# Altium schematic symbol library Diode%.SchLib: 376 symbols (part 4 of 9)
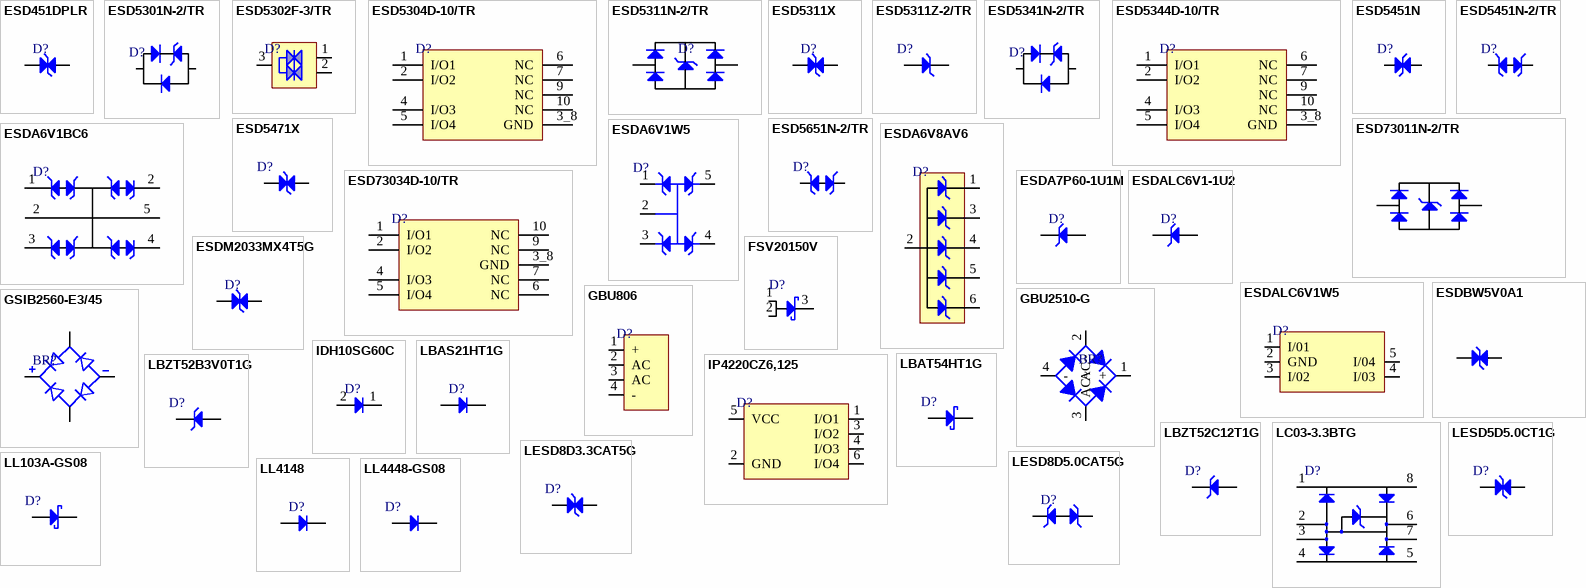
[diagram p12: symbols ESD451DPLR to LL4448-GS08]

## ESDALC6V1-1U2
designator D?
TVS DIODE 3VWM ST0201; Manufacturer: STMicroelectronics; Manufacturer Part Number: ESDALC6V1-1U2; Direction: Unidirectional; Value: 12pF; Number of Channels: 1; Reverse Breakdown Voltage: 6.1V; Reverse Standoff Voltage: 3V; Peak Pulse Power: 20W; Power Line Protection: No; Clamping Voltage: 12.2V; ESD Protection: Yes; Test Current: 1mA; Max Reverse Leakage Current: 100nA; Max Breakdown Voltage: 8V; Peak Pulse Current: 2A; Diode Type: ZENER; Supplier: Future Electronics; Supplier Part Number: 3110124; RoHS: Yes; Category: TVS Diodes; Stock: 405000; Pricing: 15000=0.0377, 45000=0.0364, 60000=0.0361, 150000=0.0351, 225000=0.0341 (USD); Mounting Technology: Surface Mount; Case/Package: 0201; Pins: 2; Case Code (Metric): 0603; Case Code (Imperial): 0201; Min Operating Temperature: -40°C; Max Operating Temperature: 125°C; Packaging: Tape and Reel; Number of Elements: 1; Number of Unidirectional Channels: 1; Min Breakdown Voltage: 6.1V; Breakdown Voltage: 6.1V; Polarity: Unidirectional; Termination: SMD/SMT; Leakage Current: 100nA; Max Power Dissipation: 20W; Power Dissipation: 20W; Series: ESDA, TRANSIL™; Length: 0.6mm; Width: 0.35mm; Height: 0.33mm; Depth: 0.3mm; Radiation Hardening: No; Reach SVHC Compliant: No; Lead Free: Lead Free; RoHS Compliant: Yes; ComponentLink1URL: https://datasheet.ciiva.com/1276/1684876-1276912.pdf?src-supplier=Element14; ComponentLink1Description: https://datasheet.ciiva.com/1276/1684876-1276912.pdf?src-supplier=Element14; ComponentLink2URL: https://datasheet.ciiva.com/4507/cd00212838-88488-4507763.pdf?src-supplier=Mouser; ComponentLink2Description: https://datasheet.ciiva.com/4507/cd00212838-88488-4507763.pdf?src-supplier=Mouser; ComponentLink3URL: https://datasheet.ciiva.com/16205/cd00212838-16205762.pdf?src-supplier=Future+Electronics; ComponentLink3Description: https://datasheet.ciiva.com/16205/cd00212838-16205762.pdf?src-supplier=Future+Electronics; ComponentLink4URL: https://datasheet.ciiva.com/15143/getdatasheetpartid-185245-15143908.pdf?src-supplier=Verical; ComponentLink4Description: https://datasheet.ciiva.com/15143/getdatasheetpartid-185245-15143908.pdf?src-supplier=Verical; ComponentLink5URL: https://datasheet.ciiva.com/22695/1684876-22695674.pdf?src-supplier=Element14; ComponentLink5Description: https://datasheet.ciiva.com/22695/1684876-22695674.pdf?src-supplier=Element14; ComponentLink6URL: https://datasheet.ciiva.com/337/cd00212838-337652.pdf?src-supplier=Digikey; ComponentLink6Description: https://datasheet.ciiva.com/337/cd00212838-337652.pdf?src-supplier=Digikey; ComponentLink7URL: https://datasheet.ciiva.com/337/cd00212838-337651.pdf?src-supplier=Digikey; ComponentLink7Description: https://datasheet.ciiva.com/337/cd00212838-337651.pdf?src-supplier=Digikey; ComponentLink8URL: https://datasheet.ciiva.com/337/cd00212838-337653.pdf?src-supplier=Digikey; ComponentLink8Description: https://datasheet.ciiva.com/337/cd00212838-337653.pdf?src-supplier=Digikey; ComponentLink9URL: https://datasheet.ciiva.com/11193/cd00212838-11193350.pdf?src-supplier=Avnet; ComponentLink9Description: https://datasheet.ciiva.com/11193/cd00212838-11193350.pdf?src-supplier=Avnet; ComponentLink10URL: https://datasheet.ciiva.com/41443/001184301-da-01-en-transil-sgl-un-esdalc6v1-1u2-st-0201-stm-41443159.pdf?src-supplier=Conrad; ComponentLink10Description: https://datasheet.ciiva.com/41443/001184301-da-01-en-transil-sgl-un-esdalc6v1-1u2-st-0201-stm-41443159.pdf?src-supplier=Conrad
footprint Diode-0201
pins: 1 K, 2 A

## ESDALC6V1W5
designator D?
TVS DIODE 3VWM SOT323-5; Manufacturer: STMicroelectronics; Manufacturer Part Number: ESDALC6V1W5; Item Type: TVS Diodes; Supplier: Future Electronics; LCSC Part Number: C703691; RoHS: Yes; Stock: 3000; Pricing: 3000=0.0569, 9000=0.0547, 12000=0.0774, 15000=0.0538, 30000=0.0749, 45000=0.0518, 75000=0.05 (USD); ComponentLink1URL: https://datasheet.ciiva.com/23847/cd00002946-23847220.pdf?src-supplier=Newark; ComponentLink1Description: https://datasheet.ciiva.com/23847/cd00002946-23847220.pdf?src-supplier=Newark; ComponentLink2URL: https://datasheet.ciiva.com/4509/cd00002946-81943-4509940.pdf?src-supplier=Mouser; ComponentLink2Description: https://datasheet.ciiva.com/4509/cd00002946-81943-4509940.pdf?src-supplier=Mouser; ComponentLink3URL: https://datasheet.ciiva.com/5782/cd00002946-5782886.pdf?src-supplier=Farnell; ComponentLink3Description: https://datasheet.ciiva.com/5782/cd00002946-5782886.pdf?src-supplier=Farnell; ComponentLink4URL: https://datasheet.ciiva.com/338/cd00002946-338376.pdf?src-supplier=Digikey; ComponentLink4Description: https://datasheet.ciiva.com/338/cd00002946-338376.pdf?src-supplier=Digikey; ComponentLink5URL: https://datasheet.ciiva.com/338/cd00002946-338377.pdf?src-supplier=Digikey; ComponentLink5Description: https://datasheet.ciiva.com/338/cd00002946-338377.pdf?src-supplier=Digikey; ComponentLink6URL: https://datasheet.ciiva.com/338/cd00002946-338378.pdf?src-supplier=Digikey; ComponentLink6Description: https://datasheet.ciiva.com/338/cd00002946-338378.pdf?src-supplier=Digikey
footprint SOT-323-5
pins: 1 I/01, 2 GND, 3 I/02, 4 I/03, 5 I/04

## ESDBW5V0A1
designator D?
DFN1006 ESD Protection Devices ROHS; Manufacturer: Leiditech; Manufacturer Part Number: ESDBW5V0A1; Item Type: ESD Diode; Package: DFN1006; LCSC Part Number: C5173252; ComponentLink1Description: LCSC; ComponentLink1URL: https://www.lcsc.com/product-detail/span-style-background-color-ff0-ESD-span-Protection-Devices_Leiditech-ESDBW5V0A1_C5173252.html
footprint DFN1006-2L_
pins: 1 A, 2 A

## ESDM2033MX4T5G
designator D?
DIODE BIDIR ESD X4DFN2; Manufacturer: ON Semiconductor; Manufacturer Part Number: ESDM2033MX4T5G; Item Type: (TVS/ESD); Supplier: Avnet; LCSC Part Number: C896720; RoHS: Yes; Stock: 629400; Pricing: 8961=0.04129, 9000=0.04018, 18000=0.03906, 45000=0.03794, 90000=0.03683, 450000=0.03571, 900000=0.0346 (USD); Series: -
footprint DFN-2(0.3x0.6)
pins: 1 A, 2 A

## FSV20150V
designator D?
DIODE SCHOTTKY 150V 20A TO2773; Manufacturer: ON Semiconductor / Fairchild; Manufacturer Part Number: FSV20150V; Item Type: Diodes; Supplier: Arrow Electronics; LCSC Part Number: C606024; RoHS: Yes; Stock: 3539; Pricing: 1=1.4397, 10=1.0081, 25=0.9981, 100=0.7548, 250=0.7285, 500=0.6712, 1000=0.6139, 3000=0.5566 (USD); ComponentLink1URL: http://www.farnell.com/datasheets/2552639.pdf?src-supplier=Farnell; ComponentLink1Description: http://www.farnell.com/datasheets/2552639.pdf?src-supplier=Farnell; ComponentLink2URL: https://www.onsemi.com/pub/Collateral/FSV20150V-D.PDF?src-supplier=Digikey; ComponentLink2Description: https://www.onsemi.com/pub/Collateral/FSV20150V-D.PDF?src-supplier=Digikey; ComponentLink3URL: https://www.fairchildsemi.com/datasheets/FS/FSV20150V.pdf?src-supplier=Digikey; ComponentLink3Description: https://www.fairchildsemi.com/datasheets/FS/FSV20150V.pdf?src-supplier=Digikey; ComponentLink4URL: http://www.farnell.com/datasheets/2552639.pdf?src-supplier=Newark; ComponentLink4Description: http://www.farnell.com/datasheets/2552639.pdf?src-supplier=Newark
footprint TO-277A
pins: 1 A, 2 A, 3 K

## GBU806
designator D?
BRIDGE RECT 1PHASE 600V 8A GBU; Manufacturer: Diodes; Manufacturer Part Number: GBU806; Item Type: Diode; Supplier: Future Electronics; LCSC Part Number: C150753; RoHS: Yes; Stock: 174414; Pricing: 20=0.565, 100=0.54, 500=0.51, 1000=0.5, 3000=0.465 (USD); ComponentLink1URL: https://datasheet.ciiva.com/27052/1540404-27052400.pdf?src-supplier=Jameco; ComponentLink1Description: https://datasheet.ciiva.com/27052/1540404-27052400.pdf?src-supplier=Jameco; ComponentLink2URL: https://datasheet.ciiva.com/16206/ds21227-16206956.pdf?src-supplier=Future+Electronics; ComponentLink2Description: https://datasheet.ciiva.com/16206/ds21227-16206956.pdf?src-supplier=Future+Electronics; ComponentLink3URL: https://datasheet.ciiva.com/15145/getdatasheetpartid-157294-15145339.pdf?src-supplier=Verical; ComponentLink3Description: https://datasheet.ciiva.com/15145/getdatasheetpartid-157294-15145339.pdf?src-supplier=Verical; ComponentLink4URL: https://datasheet.ciiva.com/885/ds21227-885908.pdf?src-supplier=Digikey; ComponentLink4Description: https://datasheet.ciiva.com/885/ds21227-885908.pdf?src-supplier=Digikey; ComponentLink5URL: https://datasheet.ciiva.com/11195/ds21227-11195657.pdf?src-supplier=Avnet; ComponentLink5Description: https://datasheet.ciiva.com/11195/ds21227-11195657.pdf?src-supplier=Avnet
footprint GBU
pins: 1 +, 2 AC, 3 AC, 4 -

## GBU2510-G
designator BR?
BRIDGE RECT 1PHASE 1KV 25A GBU; Manufacturer: Comchip; Manufacturer Part Number: GBU2510-G; Item Type: Bridge Rectifier; Max Surge Current: 350A; Max Reverse Leakage Current: 10uA; Supplier: Arrow Electronics; LCSC Part Number: C3012677; RoHS: Yes; Stock: 26; Pricing: 26=1.143, 100=1.0083, 500=0.9074, 1000=0.8027 (USD); Mounting Technology: Through Hole; Min Operating Temperature: -55°C; Max Operating Temperature: 150°C; Package Quantity: 200; Packaging: Rail/Tube; Series: -; Average Rectified Current: 25A; Lead Free: Lead Free; RoHS Compliant: Yes; ComponentLink1URL: https://datasheet.ciiva.com/886/gbu25005-gthru-gbu2510-grevc-886136.pdf?src-supplier=Digikey; ComponentLink1Description: https://datasheet.ciiva.com/886/gbu25005-gthru-gbu2510-grevc-886136.pdf?src-supplier=Digikey
footprint GBU
pins: 1 +, 2 AC~, 3 AC~, 4 -

## GSIB2560-E3/45
designator BR?
BRIDGE RECT 1P 600V 3.5A GSIB-5S; Manufacturer: Vishay Semiconductors; Manufacturer Part Number: GSIB2560-E3/45; Item Type: Bridge Rectifier; Supplier: Mouser; LCSC Part Number: C2838498; RoHS: Yes; Stock: 2131; Pricing: 1=2.95, 10=2.01, 50=2.01, 100=1.62, 1000=1.5, 10000=1.49 (USD); ComponentLink1URL: https://datasheet.ciiva.com/4238/gsib25xx-4238464.pdf?src-supplier=Arrow+Electronics; ComponentLink1Description: https://datasheet.ciiva.com/4238/gsib25xx-4238464.pdf?src-supplier=Arrow+Electronics; ComponentLink2URL: https://datasheet.ciiva.com/4238/gsib25xx-4238478.pdf?src-supplier=Arrow+Electronics; ComponentLink2Description: https://datasheet.ciiva.com/4238/gsib25xx-4238478.pdf?src-supplier=Arrow+Electronics; ComponentLink3URL: https://datasheet.ciiva.com/17099/gsib2560-e3-45-17099405.pdf?src-supplier=Allied+Electronics; ComponentLink3Description: https://datasheet.ciiva.com/17099/gsib2560-e3-45-17099405.pdf?src-supplier=Allied+Electronics; ComponentLink4URL: https://datasheet.ciiva.com/15145/getdatasheetpartid-91689-15145262.pdf?src-supplier=Verical; ComponentLink4Description: https://datasheet.ciiva.com/15145/getdatasheetpartid-91689-15145262.pdf?src-supplier=Verical; ComponentLink5URL: https://datasheet.ciiva.com/26323/gsib25xx-26323910.pdf?src-supplier=Element14; ComponentLink5Description: https://datasheet.ciiva.com/26323/gsib25xx-26323910.pdf?src-supplier=Element14; ComponentLink6URL: https://datasheet.ciiva.com/1175/gsib25xx-1175169.pdf?src-supplier=Element14; ComponentLink6Description: https://datasheet.ciiva.com/1175/gsib25xx-1175169.pdf?src-supplier=Element14; ComponentLink7URL: https://datasheet.ciiva.com/11196/gsib25xx-11196312.pdf?src-supplier=Avnet; ComponentLink7Description: https://datasheet.ciiva.com/11196/gsib25xx-11196312.pdf?src-supplier=Avnet; ComponentLink8URL: https://datasheet.ciiva.com/885/gsib25xx-885637.pdf?src-supplier=Digikey; ComponentLink8Description: https://datasheet.ciiva.com/885/gsib25xx-885637.pdf?src-supplier=Digikey; ComponentLink9URL: https://datasheet.ciiva.com/16387/gsib20xx-16387863.pdf?src-supplier=Future+Electronics; ComponentLink9Description: https://datasheet.ciiva.com/16387/gsib20xx-16387863.pdf?src-supplier=Future+Electronics
footprint GSIB-5S
pins: AC1, AC2, NEG, POS

## IDH10SG60C
designator D?
600V 1.8V@10A 10A TO-220-2 SiC Diodes ROHS; Manufacturer: Infineon; Manufacturer Part Number: IDH10SG60C; Supplier: Mouser; LCSC Part Number: C535874; RoHS: Yes; Item Type: Diodes; Stock: 239; Pricing: 1=5.14, 10=4.32, 50=4.32, 100=3.49, 1000=2.66, 10000=2.5 (USD); ComponentLink1URL: https://datasheet.ciiva.com/924/infineon-idh10sg60c-ds-v02-04-en-924234.pdf?src-supplier=Digikey; ComponentLink1Description: https://datasheet.ciiva.com/924/infineon-idh10sg60c-ds-v02-04-en-924234.pdf?src-supplier=Digikey; ComponentLink2URL: https://datasheet.ciiva.com/16386/idh10sg60c-rev2-4-78863-16386579.pdf?src-supplier=Mouser; ComponentLink2Description: https://datasheet.ciiva.com/16386/idh10sg60c-rev2-4-78863-16386579.pdf?src-supplier=Mouser; ComponentLink3URL: https://datasheet.ciiva.com/8300/infineon-idh10sg60c-ds-v02-04-en-8300971.pdf?src-supplier=Avnet; ComponentLink3Description: https://datasheet.ciiva.com/8300/infineon-idh10sg60c-ds-v02-04-en-8300971.pdf?src-supplier=Avnet
footprint TO-220-2
pins: 1 K, 2 A

## IP4220CZ6,125
designator D?
TVS DIODE 5.5VWM 6TSOP; Manufacturer: Nexperia; Manufacturer Part Number: IP4220CZ6,125; Item Type: ESD; Breakdown Voltage: 6V; Number of Channels: 4NUMBER; Operating Supply Voltage: 700mV; Supplier: Future Electronics; LCSC Part Number: C282546; RoHS: Yes; Stock: 63000; Pricing: 3000=0.109, 9000=0.106, 12000=0.105, 30000=0.103, 45000=0.1 (USD); Pins: 6NUMBER; Min Operating Temperature: -40°C; Max Operating Temperature: 85°C; ComponentLink1URL: http://www.farnell.com/datasheets/1708221.pdf?src-supplier=Farnell; ComponentLink1Description: http://www.farnell.com/datasheets/1708221.pdf?src-supplier=Farnell; ComponentLink2URL: https://assets.nexperia.com/documents/data-sheet/IP4220CZ6.pdf?src-supplier=Digikey; ComponentLink2Description: https://assets.nexperia.com/documents/data-sheet/IP4220CZ6.pdf?src-supplier=Digikey; ComponentLink3URL: https://datasheet.octopart.com/IP4220CZ6%2C125-Nexperia-datasheet-10325773.pdf?src-supplier=Element14; ComponentLink3Description: https://datasheet.octopart.com/IP4220CZ6%2C125-Nexperia-datasheet-10325773.pdf?src-supplier=Element14; ComponentLink4URL: http://www.farnell.com/datasheets/1708221.pdf?src-supplier=Newark; ComponentLink4Description: http://www.farnell.com/datasheets/1708221.pdf?src-supplier=Newark
footprint 6-TSOP
pins: 1 I/O1, 2 GND, 3 I/O2, 4 I/O3, 5 VCC, 6 I/O4

## LBAS21HT1G
designator D?
250V 200mW Single 1.25V 50ns 200mA SOD-323 Switching Diode ROHS; Manufacturer: LRC; Manufacturer Part Number: LBAS21HT1G; Package: SOD-323; LCSC Part Number: C12742; Item Type: Diode; ComponentLink1Description: LCSC; ComponentLink1URL: https://www.lcsc.com/product-detail/Switching-Diode_LRC-LBAS21HT1G_C12742.html
footprint SOD-323
pins: 1 K, 2 A

## LBAT54HT1G
designator D?
30V 0.4V 0.2A SOD-323 Schottky Barrier Diodes (SBD) ROHS; Manufacturer: LRC; Manufacturer Part Number: LBAT54HT1G; Item Type: Diode; Package: SOD-323; LCSC Part Number: C12744; ComponentLink1Description: LCSC; ComponentLink1URL: https://www.lcsc.com/product-detail/Schottky-Barrier-Diodes-SBD_LRC-LBAT54HT1G_C12744.html
footprint SOD-323
pins: 1 K, 2 A

## LBZT52B3V0T1G
designator D?
Single 3.01V~3.22V 500mW 3.1V SOD-123 Zener Diodes ROHS; Manufacturer: LRC; Manufacturer Part Number: LBZT52B3V0T1G; Item Type: Diode; Package: SOD-123; LCSC Part Number: C2972805; ComponentLink1Description: LCSC
footprint SOD-123
pins: 1 A, 2 K

## LBZT52C12T1G
designator D?
Independent Type 11.4V~12.7V 500mW 12V SOD-123 Zener Diodes ROHS; Manufacturer: LRC; Manufacturer Part Number: LBZT52C12T1G; Item Type: Diode; Package: SOD-123; LCSC Part Number: C12747; ComponentLink1Description: LCSC; ComponentLink1URL: https://www.lcsc.com/product-detail/Zener-Diodes_LRC-LBZT52C12T1G_C12747.html?s_z=n_BZT52C12
footprint SOD-123
pins: 1 A, 2 K

## LC03-3.3BTG
designator D?
TVS DIODE 3.3VWM 17VC 8-SOIC; Manufacturer: Littelfuse; Manufacturer Part Number: LC03-3.3BTG; Item Type: TVS Diodes; Breakdown Voltage: 3.3V; Value: 9pF; Clamping Voltage: 20V; Direction: Unidirectional; Leakage Current: 1µA; Max Junction Temperature (Tj): 150°C; Max Power Dissipation: 3.3kW; Number of Bidirectional Channels: 2; Number of Elements: 1; Peak Pulse Current: 150A; Power Line Protection: Yes; Supplier: DigiKey; LCSC Part Number: C315938; RoHS: Compliant; Stock: 25009; Pricing: 1=1.8, 10=1.51, 100=1.27, 500=1.2393 (USD); Case/Package: SOIC; Depth: 4mm; Height: 1.75mm; Lead Free: Lead Free; Length: 5mm; Lifecycle Status: Production; Max Operating Temperature: 125°C; Max Reverse Leakage Current: 1µA; Min Breakdown Voltage: 3.3V; Min Operating Temperature: -40°C; Mounting Technology: Surface Mount; Number of Channels: 2; Pins: 8; Number of Terminals: 8; Operating Supply Voltage: 3.3V; Packaging: Cut Tape; Peak Pulse Power: 3.3kW; Polarity: Unidirectional; Radiation Hardening: No; REACH SVHC: Yes; Reverse Standoff Voltage: 3.3V; Schedule B: 8536300000, 8536300000|8536300000|8536300000|8536300000|8536300000|8536300000|8536300000|8536300000|8536300000|8536300000|8536300000|8536300000|8536300000|8536300000|8536300000|8536300000|8536300000|8536300000|8536300000|8536300000|8536300000|8536300000|8536300000|85; Termination: SMD/SMT; Width: 4mm; Working Voltage: 3.3V; ComponentLink1URL: https://datasheet.octopart.com:443/LC03-3.3BTG-Littelfuse-datasheet-138896953.pdf?src-supplier=JRH+Electronics; ComponentLink1Description: https://datasheet.octopart.com:443/LC03-3.3BTG-Littelfuse-datasheet-138896953.pdf?src-supplier=JRH+Electronics; ComponentLink2URL: https://datasheet.octopart.com:443/LC03-3.3BTG-Littelfuse-datasheet-41120990.pdf?src-supplier=Fuses+Unlimited; ComponentLink2Description: https://datasheet.octopart.com:443/LC03-3.3BTG-Littelfuse-datasheet-41120990.pdf?src-supplier=Fuses+Unlimited; ComponentLink3URL: https://datasheet.octopart.com:443/LC03-3.3BTG-Littelfuse-datasheet-11775566.pdf?src-supplier=Farnell; ComponentLink3Description: https://datasheet.octopart.com:443/LC03-3.3BTG-Littelfuse-datasheet-11775566.pdf?src-supplier=Farnell; ComponentLink4URL: https://datasheet.octopart.com:443/LC03-3.3BTG-Littelfuse-datasheet-82522102.pdf?src-supplier=Newark; ComponentLink4Description: https://datasheet.octopart.com:443/LC03-3.3BTG-Littelfuse-datasheet-82522102.pdf?src-supplier=Newark; ComponentLink5URL: https://datasheet.octopart.com:443/LC03-3.3BTG-Littelfuse-datasheet-78834554.pdf?src-supplier=element14+APAC; ComponentLink5Description: https://datasheet.octopart.com:443/LC03-3.3BTG-Littelfuse-datasheet-78834554.pdf?src-supplier=element14+APAC
footprint SOIC-8(0.154", 3.90mm Width)
pins: 1, 2, 3, 4, 5, 6, 7, 8

## LESD5D5.0CT1G
designator D?
SOD-523 ESD Protection Devices ROHS; Manufacturer: UMW; Manufacturer Part Number: LESD5D5.0CT1G; Package: SOD-523; LCSC Part Number: C5199850; Item Type: Protection Device; ComponentLink1Description: LCSC; ComponentLink1URL: https://www.lcsc.com/product-detail/span-style-background-color-ff0-ESD-span-Protection-Devices_UMW-Youtai-Semiconductor-Co-Ltd-LESD5D5-0CT1G_C5199850.html
footprint SOD-523 (Bi-Directional)
pins: 1 A, 2 A

## LESD8D3.3CAT5G
designator D?
5V 10V 3.3V Bi-Directional SOD-882 ESD Protection Devices ROHS; Manufacturer: LRC; Manufacturer Part Number: LESD8D3.3CAT5G; Package: SOD-882; LCSC Part Number: C172409; Item Type: Protection Device; ComponentLink1Description: LCSC; ComponentLink1URL: https://www.lcsc.com/product-detail/span-style-background-color-ff0-ESD-span-Protection-Devices_LRC-LESD8D3-3CAT5G_C172409.html
footprint SOD-882 Bi Directional
pins: 1 A, 2 A

## LESD8D5.0CAT5G
designator D?
DFN1006-2 ESD and Surge Protection (TVS/ESD) ROHS; Manufacturer: LRC; Manufacturer Part Number: LESD8D5.0CAT5G; Item Type: Protection Device; Package: DFN1006-2; LCSC Part Number: C2987694; ComponentLink1Description: LCSC; ComponentLink1URL: https://www.lcsc.com/product-detail/ESD-and-Surge-Protection-TVS-ESD_UMW-Youtai-Semiconductor-Co-Ltd-LESD8D5-0CAT5G_C2987694.html
footprint DFN1006-2L (Bi-Directional)
pins: 1, 2

## LL103A-GS08
designator D?
DIODE SCHOTTKY 40V 200MA SOD80; Manufacturer: Vishay; Manufacturer Part Number: LL103A-GS08; Item Type: Schottky Diodes; Body Material: Glass; Value: 50pF; Current Rating: 400A; Element Configuration: Single; Forward Voltage: 370mV; Max Forward Surge Current (Ifsm): 15A; Max Junction Temperature (Tj): 125°C; Max Power Dissipation: 400mW; Max Reverse Leakage Current: 5µA; Number of Elements: 1; Recovery Time: 10ns; Supplier: Avnet; LCSC Part Number: C2979792; RoHS: Compliant; Stock: 37500; Pricing: 12500=0.05045 (USD); Average Rectified Current: 200mA; China RoHS: Non-Compliant; Contact Plating: Silver, Tin; Diameter: 1.6mm; Forward Current: 200mA; Height: 1.6mm; Lead Free: Lead Free; Length: 3.7mm; Lifecycle Status: Production; Max Operating Temperature: 125°C; Max Output current: 200mA; Max Repetitive Reverse Voltage (Vrrm): 40V; Max Reverse Voltage (DC): 40V; Max Surge Current: 15A; Min Operating Temperature: -65°C; Mounting Technology: Surface Mount; Pins: 2; Number of Terminals: 2; Packaging: Cut Tape; Peak Non-Repetitive Surge Current: 15A; Peak Reverse Current: 5µA; Power Dissipation: 400mW; Radiation Hardening: No; REACH SVHC: Yes; Reverse Recovery Time: 10ns; Reverse Standoff Voltage: 40V; Reverse Voltage: 40V; Schedule B: 8541100070, 8541100070|8541100070|8541100070|8541100070|8541100070; Width: 1.6mm; ComponentLink1URL: https://datasheet.octopart.com:443/LL103A-GS08-Vishay-datasheet-181469840.pdf?src-supplier=Farnell; ComponentLink1Description: https://datasheet.octopart.com:443/LL103A-GS08-Vishay-datasheet-181469840.pdf?src-supplier=Farnell; ComponentLink2URL: https://datasheet.octopart.com:443/LL103A-GS08-Vishay-datasheet-10540872.pdf?src-supplier=Farnell; ComponentLink2Description: https://datasheet.octopart.com:443/LL103A-GS08-Vishay-datasheet-10540872.pdf?src-supplier=Farnell; ComponentLink3URL: https://datasheet.octopart.com:443/LL103A-GS08-Vishay-datasheet-8365623.pdf?src-supplier=Farnell; ComponentLink3Description: https://datasheet.octopart.com:443/LL103A-GS08-Vishay-datasheet-8365623.pdf?src-supplier=Farnell; ComponentLink4URL: https://datasheet.octopart.com:443/LL103A-GS08-Vishay-datasheet-11751478.pdf?src-supplier=_legacy+Avnet; ComponentLink4Description: https://datasheet.octopart.com:443/LL103A-GS08-Vishay-datasheet-11751478.pdf?src-supplier=_legacy+Avnet; ComponentLink5URL: https://datasheet.octopart.com:443/LL103A-GS08-Vishay-datasheet-181483661.pdf?src-supplier=IHS; ComponentLink5Description: https://datasheet.octopart.com:443/LL103A-GS08-Vishay-datasheet-181483661.pdf?src-supplier=IHS; ComponentLink6URL: https://datasheet.octopart.com:443/LL103A-GS08-Vishay-datasheet-62318247.pdf?src-supplier=Newark; ComponentLink6Description: https://datasheet.octopart.com:443/LL103A-GS08-Vishay-datasheet-62318247.pdf?src-supplier=Newark; ComponentLink7URL: https://datasheet.octopart.com:443/LL103A-GS08.-Vishay-datasheet-184398164.pdf?src-supplier=Newark; ComponentLink7Description: https://datasheet.octopart.com:443/LL103A-GS08.-Vishay-datasheet-184398164.pdf?src-supplier=Newark; ComponentLink8URL: https://datasheet.octopart.com:443/LL103A-GS08-Vishay-datasheet-21268782.pdf?src-supplier=Newark; ComponentLink8Description: https://datasheet.octopart.com:443/LL103A-GS08-Vishay-datasheet-21268782.pdf?src-supplier=Newark; ComponentLink9URL: https://datasheet.octopart.com:443/LL103A-GS08-Vishay-datasheet-7183.pdf?src-supplier=Newark; ComponentLink9Description: https://datasheet.octopart.com:443/LL103A-GS08-Vishay-datasheet-7183.pdf?src-supplier=Newark; ComponentLink10URL: https://datasheet.octopart.com:443/LL103A-GS08-Vishay-datasheet-5392692.pdf?src-supplier=element14; ComponentLink10Description: https://datasheet.octopart.com:443/LL103A-GS08-Vishay-datasheet-5392692.pdf?src-supplier=element14; ComponentLink11URL: https://datasheet.octopart.com:443/LL103A-GS08-Vishay-datasheet-159617103.pdf?src-supplier=element14+APAC; ComponentLink11Description: https://datasheet.octopart.com:443/LL103A-GS08-Vishay-datasheet-159617103.pdf?src-supplier=element14+APAC; ComponentLink12URL: https://datasheet.octopart.com:443/LL103A-GS08-Vishay-datasheet-42424840.pdf?src-supplier=TME; ComponentLink12Description: https://datasheet.octopart.com:443/LL103A-GS08-Vishay-datasheet-42424840.pdf?src-supplier=TME; ComponentLink13URL: https://datasheet.octopart.com:443/LL103A-GS08-Vishay-datasheet-14186831.pdf?src-supplier=iiiC; ComponentLink13Description: https://datasheet.octopart.com:443/LL103A-GS08-Vishay-datasheet-14186831.pdf?src-supplier=iiiC; ComponentLink14URL: https://datasheet.octopart.com:443/LL103A-GS08-Vishay-datasheet-10014030.pdf?src-supplier=RS+(Formerly+Allied+Electronics); ComponentLink14Description: https://datasheet.octopart.com:443/LL103A-GS08-Vishay-datasheet-10014030.pdf?src-supplier=RS+(Formerly+Allied+Electronics); ComponentLink15URL: https://datasheet.octopart.com:443/LL103A-GS08-Vishay-datasheet-72214.pdf?src-supplier=RS+(Formerly+Allied+Electronics); ComponentLink15Description: https://datasheet.octopart.com:443/LL103A-GS08-Vishay-datasheet-72214.pdf?src-supplier=RS+(Formerly+Allied+Electronics); ComponentLink16URL: http://sigma.octopart.com:80/rohs_statement/Vishay-company-15.pdf?src-supplier=Compliance+Statements; ComponentLink16Description: http://sigma.octopart.com:80/rohs_statement/Vishay-company-15.pdf?src-supplier=Compliance+Statements
footprint LL-34
pins: 1 K, 2 A

## LL4148
designator D?
75V 1V@10mA 4ns 200mA LL-34 Switching Diode ROHS; Manufacturer: MDD; Manufacturer Part Number: LL4148; Package: LL-34; LCSC Part Number: C435829; Item Type: Diode; ComponentLink1Description: LCSC; ComponentLink1URL: https://www.lcsc.com/product-detail/Switching-Diode_MDD-Microdiode-Electronics-LL4148_C435829.html
footprint LL-34
pins: 1 A, 2 K

## LL4448-GS08
designator D?
DIODE STANDARD 75V 150MA SOD80C; Manufacturer: Vishay; Manufacturer Part Number: LL4448-GS08; Item Type: Rectifier Diodes; Body Material: Glass; Value: 4pF; Current: 500mA; Element Configuration: Single; Forward Current: 300mA; Forward Voltage: 1V; Max Forward Surge Current (Ifsm): 2A; Max Junction Temperature (Tj): 175°C; Max Power Dissipation: 500mW; Max Repetitive Reverse Voltage (Vrrm): 100V; Max Reverse Leakage Current: 5µA; Number of Elements: 1; Recovery Time: 8ns; Supplier: Avnet; LCSC Part Number: C19078472; RoHS: Compliant; Stock: 12093; Pricing: 1=0.105, 25=0.072, 100=0.06, 250=0.053, 500=0.043 (USD); Average Rectified Current: 150mA; China RoHS: Non-Compliant; Contact Plating: Silver, Tin; Diameter: 1.6mm; Height: 1.6mm; Lead Free: Lead Free; Length: 3.683mm; Lifecycle Status: Production; Max Operating Temperature: 175°C; Max Output current: 150mA; Max Reverse Voltage (DC): 75V; Max Surge Current: 2A; Min Breakdown Voltage: 100V; Min Operating Temperature: -65°C; Mounting Technology: Surface Mount; Pins: 2; Number of Terminals: 2; Packaging: Cut Tape; Peak Non-Repetitive Surge Current: 2A; Peak Reverse Current: 5µA; Power Dissipation: 500mW; Radiation Hardening: No; REACH SVHC: No; Reverse Recovery Time: 8ns; Reverse Standoff Voltage: 75V; Reverse Voltage: 75V; Schedule B: 8541100070, 8541100070|8541100070|8541100070|8541100070|8541100070; Termination: SMD/SMT; Voltage: 75V; ComponentLink1URL: https://datasheet.octopart.com:443/LL4448-GS08-Vishay-datasheet-165827647.pdf?src-supplier=Newark; ComponentLink1Description: https://datasheet.octopart.com:443/LL4448-GS08-Vishay-datasheet-165827647.pdf?src-supplier=Newark; ComponentLink2URL: https://datasheet.octopart.com:443/LL4448-GS08-Vishay-datasheet-62318255.pdf?src-supplier=Newark; ComponentLink2Description: https://datasheet.octopart.com:443/LL4448-GS08-Vishay-datasheet-62318255.pdf?src-supplier=Newark; ComponentLink3URL: https://datasheet.octopart.com:443/LL4448-GS08-Vishay-datasheet-34180280.pdf?src-supplier=Newark; ComponentLink3Description: https://datasheet.octopart.com:443/LL4448-GS08-Vishay-datasheet-34180280.pdf?src-supplier=Newark; ComponentLink4URL: https://datasheet.octopart.com:443/LL4448-GS08-Vishay-datasheet-5440278.pdf?src-supplier=Newark; ComponentLink4Description: https://datasheet.octopart.com:443/LL4448-GS08-Vishay-datasheet-5440278.pdf?src-supplier=Newark; ComponentLink5URL: https://datasheet.octopart.com:443/LL4448-GS08-Vishay-Semiconductor-datasheet-33013835.pdf?src-supplier=Newark; ComponentLink5Description: https://datasheet.octopart.com:443/LL4448-GS08-Vishay-Semiconductor-datasheet-33013835.pdf?src-supplier=Newark; ComponentLink6URL: https://datasheet.octopart.com:443/LL4448-GS08-Vishay-datasheet-8477288.pdf?src-supplier=_legacy+Avnet; ComponentLink6Description: https://datasheet.octopart.com:443/LL4448-GS08-Vishay-datasheet-8477288.pdf?src-supplier=_legacy+Avnet; ComponentLink7URL: https://datasheet.octopart.com:443/LL4448-GS08-Vishay-datasheet-12511824.pdf?src-supplier=_legacy+Avnet; ComponentLink7Description: https://datasheet.octopart.com:443/LL4448-GS08-Vishay-datasheet-12511824.pdf?src-supplier=_legacy+Avnet; ComponentLink8URL: https://datasheet.octopart.com:443/LL4448-GS08-Vishay-datasheet-8854176.pdf?src-supplier=_legacy+Avnet; ComponentLink8Description: https://datasheet.octopart.com:443/LL4448-GS08-Vishay-datasheet-8854176.pdf?src-supplier=_legacy+Avnet; ComponentLink9URL: https://datasheet.octopart.com:443/LL4448-GS08-Vishay-datasheet-181483663.pdf?src-supplier=IHS; ComponentLink9Description: https://datasheet.octopart.com:443/LL4448-GS08-Vishay-datasheet-181483663.pdf?src-supplier=IHS; ComponentLink10URL: https://datasheet.octopart.com:443/LL4448-GS08-Vishay-datasheet-616916.pdf?src-supplier=element14; ComponentLink10Description: https://datasheet.octopart.com:443/LL4448-GS08-Vishay-datasheet-616916.pdf?src-supplier=element14; ComponentLink11URL: https://datasheet.octopart.com:443/LL4448-GS08-Vishay-datasheet-170554758.pdf?src-supplier=Burklin+Elektronik; ComponentLink11Description: https://datasheet.octopart.com:443/LL4448-GS08-Vishay-datasheet-170554758.pdf?src-supplier=Burklin+Elektronik; ComponentLink12URL: https://datasheet.octopart.com:443/LL4448-GS08-Vishay-datasheet-152532718.pdf?src-supplier=TME; ComponentLink12Description: https://datasheet.octopart.com:443/LL4448-GS08-Vishay-datasheet-152532718.pdf?src-supplier=TME; ComponentLink13URL: https://datasheet.octopart.com:443/LL4448-GS08-Vishay-datasheet-41857211.pdf?src-supplier=TME; ComponentLink13Description: https://datasheet.octopart.com:443/LL4448-GS08-Vishay-datasheet-41857211.pdf?src-supplier=TME; ComponentLink14URL: https://datasheet.octopart.com:443/LL4448-GS08-Vishay-datasheet-101751515.pdf?src-supplier=Future+Electronics; ComponentLink14Description: https://datasheet.octopart.com:443/LL4448-GS08-Vishay-datasheet-101751515.pdf?src-supplier=Future+Electronics; ComponentLink15URL: https://datasheet.octopart.com:443/LL4448-GS08-Vishay-datasheet-9640167.pdf?src-supplier=RS+(Formerly+Allied+Electronics); ComponentLink15Description: https://datasheet.octopart.com:443/LL4448-GS08-Vishay-datasheet-9640167.pdf?src-supplier=RS+(Formerly+Allied+Electronics); ComponentLink16URL: https://datasheet.octopart.com:443/LL4448-GS08-Vishay-datasheet-76570.pdf?src-supplier=RS+(Formerly+Allied+Electronics); ComponentLink16Description: https://datasheet.octopart.com:443/LL4448-GS08-Vishay-datasheet-76570.pdf?src-supplier=RS+(Formerly+Allied+Electronics); ComponentLink17URL: http://sigma.octopart.com:80/rohs_statement/Vishay-company-15.pdf?src-supplier=Compliance+Statements; ComponentLink17Description: http://sigma.octopart.com:80/rohs_statement/Vishay-company-15.pdf?src-supplier=Compliance+Statements
footprint LL-34
pins: 1 K, 2 A

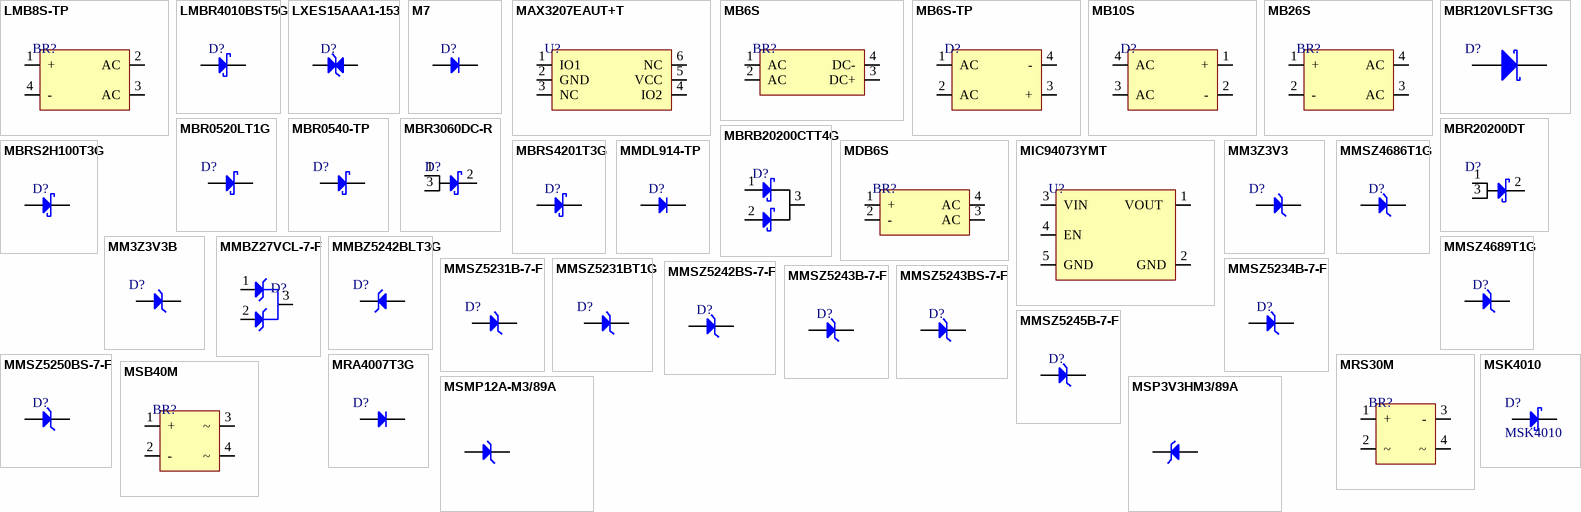
[diagram p4: symbols LMB8S-TP to MSP3V3HM3/89A]

## LMB8S-TP
designator BR?
30A 950mV@400mA 1A 800V LMBS-1 Bridge Rectifiers ROHS; Manufacturer: MCC(Micro Commercial Components); Manufacturer Part Number: LMB8S-TP; Package: LMBS-1; LCSC Part Number: C435904; Item Type: Bridge; ComponentLink1Description: LCSC; ComponentLink1URL: https://www.lcsc.com/product-detail/Bridge-Rectifiers_MCC-Micro-Commercial-Components-LMB8S-TP_C435904.html?s_z=n_MB8S-TP
footprint LMBS-1
pins: 1 +, 2 AC, 3 AC, 4 -

## LMBR4010BST5G
designator D?
40V Independent Type 1A 600mV SOD-882 Schottky Diodes ROHS; Manufacturer: LRC; Manufacturer Part Number: LMBR4010BST5G; Item Type: Diode; Package: SOD-882; LCSC Part Number: C2912031; ComponentLink1Description: LCSC; ComponentLink1URL: https://www.lcsc.com/product-detail/Schottky-Barrier-Diodes-SBD_LRC-LMBR4010BST5G_C2912031.html
footprint SOD-882
pins: 1 A, 2 K

## LXES15AAA1-153
designator D?
40V Bidirectional 5V DFN1006-2 ESD and Surge Protection (TVS/ESD) ROHS; Manufacturer: TECH PUBLIC; Manufacturer Part Number: LXES15AAA1-153; Package: DFN1006-2; LCSC Part Number: C7472903; Item Type: (TVS/ESD); ComponentLink1Description: LCSC; ComponentLink1URL: https://www.lcsc.com/product-detail/ESD-and-Surge-Protection-TVS-ESD_TECH-PUBLIC-LXES15AAA1-153_C7472903.html
footprint DFN1006-2L (Bi-Directional)
pins: 1 A, 2 A

## M7
designator D?
1A 1.1V@1A 1kV DO-214AC Diodes - General Purpose ROHS; Manufacturer: MSKSEMI; Manufacturer Part Number: M7; Item Type: Diode; Package: DO-214AC; LCSC Part Number: C2902910; ComponentLink1Description: LCSC; ComponentLink1URL: https://www.lcsc.com/product-detail/Diodes-General-Purpose_MSKSEMI-M7_C2902910.html
footprint SMA(DO-214AC)
pins: 1 K, 2 A

## MAX3207EAUT+T
designator U?
TVS DIODE SOT23-6; Manufacturer: Maxim; Manufacturer Part Number: MAX3207EAUT+T; Value: 2.5pF; Operating Supply Voltage: 5.5V; Direction: Unidirectional; Number of Channels: 2; Peak Pulse Power: 696mW; Power Line Protection: Yes; Min Breakdown Voltage: 950mV; Max Reverse Leakage Current: 100nA; Test Current: 10mA; Peak Pulse Current: 45A; Supplier: Mouser; LCSC Part Number: C518981; RoHS: Yes; Item Type: TVS Diodes; Stock: 1308; Pricing: 1=2.38, 10=1.63, 50=1.61, 100=1.17, 1000=0.926, 10000=0.905 (USD); Mounting Technology: Surface Mount; Case/Package: SOT-23-6; Pins: 6; Min Operating Temperature: -40°C; Max Operating Temperature: 125°C; Termination: SMD/SMT; Max Power Dissipation: 696mW; ESD Protection: Yes; Packaging: Tape and Reel; Package Quantity: 2500; Series: -; Number of Unidirectional Channels: 2; Length: 3mm; Width: 1.75mm; Height: 1.3mm; Radiation Hardening: No; Lead Free: Lead Free; Reach SVHC Compliant: Unknown; RoHS Compliant: Yes; ComponentLink1URL: https://datasheet.ciiva.com/14423/max3205e-max3208e-14423772.pdf?src-supplier=Avnet; ComponentLink1Description: https://datasheet.ciiva.com/14423/max3205e-max3208e-14423772.pdf?src-supplier=Avnet; ComponentLink2URL: https://datasheet.ciiva.com/340/max3205e-max3208e-340379.pdf?src-supplier=Digikey; ComponentLink2Description: https://datasheet.ciiva.com/340/max3205e-max3208e-340379.pdf?src-supplier=Digikey; ComponentLink3URL: https://datasheet.ciiva.com/340/max3205e-max3208e-340380.pdf?src-supplier=Digikey; ComponentLink3Description: https://datasheet.ciiva.com/340/max3205e-max3208e-340380.pdf?src-supplier=Digikey; ComponentLink4URL: https://datasheet.ciiva.com/340/max3205e-max3208e-340378.pdf?src-supplier=Digikey; ComponentLink4Description: https://datasheet.ciiva.com/340/max3205e-max3208e-340378.pdf?src-supplier=Digikey
footprint SOT-23-6
pins: 1 IO1, 2 GND, 3 NC, 4 IO2, 5 VCC, 6 NC

## MB6S
designator BR?
MBS Bridge Rectifiers ROHS; Manufacturer: YONGYUTAI; Manufacturer Part Number: MB6S; Package: MBS; LCSC Part Number: C2892564; Item Type: Bridge Rectifier; ComponentLink1Description: LCSC; ComponentLink1URL: https://www.lcsc.com/product-detail/Bridge-Rectifiers_MDD-Microdiode-Electronics-MB6S_C114014.html
footprint MBS
pins: 1 AC, 2 AC, 3 DC+, 4 DC-

## MB6S-TP
designator D?
35A 1V@400mA 800mA 600V MBS Bridge Rectifiers ROHS; Manufacturer: MCC(Micro Commercial Components); Manufacturer Part Number: MB6S-TP; Package: MBS; LCSC Part Number: C85619; Item Type: Bridge Rectifier; ComponentLink1Description: LCSC; ComponentLink1URL: https://www.lcsc.com/product-detail/Bridge-Rectifiers_MCC_MB6S-TP_MB6S-TP_C85619.html?gclid=CjwKCAjwjOunBhB4EiwA94JWsPhP5VxdRhkKtNAXxaeRo8Kbw1z5VNRY74bvbkYd4a4LtLXYHGrsEhoCPX4QAvD_BwE
footprint MBS
pins: 1 AC, 2 AC, 3 +, 4 -

## MB10S
designator D?
35A 1.1V@400mA 1A 1kV MBS Bridge Rectifiers ROHS; Manufacturer: MDD; Manufacturer Part Number: MB10S; Package: MBS; JLCPCB Part Number: C2488; Item Type: Bridge Rectifier; ComponentLink1Description: LCSC; ComponentLink1URL: https://www.lcsc.com/product-detail/Bridge-Rectifiers_MCC_MB6S-TP_MB6S-TP_C85619.html?gclid=CjwKCAjwjOunBhB4EiwA94JWsPhP5VxdRhkKtNAXxaeRo8Kbw1z5VNRY74bvbkYd4a4LtLXYHGrsEhoCPX4QAvD_BwE
footprint MBS10S
pins: 1 +, 2 -, 3 AC, 4 AC

## MB26S
designator BR?
50A 700mV@2A 2A 60V MBS Bridge Rectifiers ROHS; Manufacturer: MDD; Manufacturer Part Number: MB26S; Package: MBS; LCSC Part Number: C840748; Item Type: Bridge Rectifier; ComponentLink1Description: LCSC; ComponentLink1URL: https://www.lcsc.com/product-detail/Bridge-Rectifiers_MDD-Microdiode-Semiconductor-MB26S_C840748.html
footprint MB26S
pins: 1 +, 2 -, 3 AC, 4 AC

## MBR120VLSFT3G
designator D?
DIODE SCHOTTKY 20V 1A SOD123FL; Manufacturer: ON Semiconductor; Manufacturer Part Number: MBR120VLSFT3G; Max Surge Current: 45A; Forward Voltage: 340mV; Peak Reverse Current: 600uA; Element Configuration: Single; Polarity: Standard; Supplier 1: Digi-Key; Stock 1: 130499; Pricing 1: 1=0.42, 10=0.338, 100=0.2298, 500=0.17234, 1000=0.12926 (USD); Number of Pins: 2; Min Operating Temperature: -65°C; Max Operating Temperature: 125°C; Package Quantity: 10000; Forward Current: 1A; Packaging: Tape and Reel; Max Reverse Leakage Current: 600uA; Average Rectified Current: 1A; Peak Non-Repetitive Surge Current: 45A; Max Repetitive Reverse Voltage (Vrrm): 20V; Max Forward Surge Current (Ifsm): 45A; Voltage Rating (DC): 20V; Current Rating: 1A; Output Current: 1A; Max Reverse Voltage (DC): 20V; Radiation Hardening: No; REACH SVHC: No SVHC; Lead Free: Lead Free; Halogen Free: Halogen Free; ComponentLink1URL: http://www.mouser.com/ds/2/308/MBR120VLSFT1-D-107081.pdf?src-supplier=Mouser; ComponentLink1Description: http://www.mouser.com/ds/2/308/MBR120VLSFT1-D-107081.pdf?src-supplier=Mouser; ComponentLink2URL: http://www.onsemi.com/pub/Collateral/MBR120VLSFT1-D.PDF?src-supplier=Digi-Key; ComponentLink2Description: http://www.onsemi.com/pub/Collateral/MBR120VLSFT1-D.PDF?src-supplier=Digi-Key; ComponentLink3URL: http://www.onsemi.cn/pub_link/Collateral/MBR120VLSFT1-D.PDF?src-supplier=Avnet; ComponentLink3Description: http://www.onsemi.cn/pub_link/Collateral/MBR120VLSFT1-D.PDF?src-supplier=Avnet; Supplier Part Number 1: MBR120VLSFT3GOSCT-ND; LCSC Part Number: C295749
footprint SOD-123
pins: 1 A, 2 K

## MBR0520LT1G
designator D?
DIODE SCHOTTKY 20V 500MA SOD123; Manufacturer: ON Semiconductor; Manufacturer Part Number: MBR0520LT1G; Forward Voltage: 385mV; Polarity: Standard; Max Surge Current: 5.5A; Max Reverse Current: 250uA; Element Configuration: Single; Supplier: Digikey; Supplier Part Number: MBR0520LT1GOSDKR-ND; RoHS: Yes; Category: Schottky Diodes; Pricing: 1=0.36, 10=0.255, 100=0.129, 500=0.1052, 1000=0.07805 (USD); Case/Package: SOD-123-2; Pins: 2; Min Operating Temperature: -65°C; Max Operating Temperature: 125°C; Voltage Rating (DC): 20V; Current Rating: 500mA; Output Current: 500mA; Packaging: Tape and Reel; Package Quantity: 1; Forward Current: 500mA; Average Rectified Current: 500mA; Max Reverse Leakage Current: 250uA; Max Repetitive Reverse Voltage (Vrrm): 20V; Peak Non-Repetitive Surge Current: 5.5A; Max Forward Surge Current (Ifsm): 5.5A; Termination: SMD/SMT; Max Reverse Voltage (DC): 20V; Series: -; Length: 2.69mm; Width: 1.6mm; Height: 1.12mm; Radiation Hardening: No; Lead Free: Lead Free; Reach SVHC Compliant: No; RoHS Compliant: Yes; ComponentLink1URL: https://datasheet.ciiva.com/915/mbr0520lt1-d-915488.pdf?src-supplier=Avnet; ComponentLink1Description: https://datasheet.ciiva.com/915/mbr0520lt1-d-915488.pdf?src-supplier=Avnet; ComponentLink2URL: https://datasheet.ciiva.com/915/mbr0520lt1-d-915488.pdf?src-supplier=Digikey; ComponentLink2Description: https://datasheet.ciiva.com/915/mbr0520lt1-d-915488.pdf?src-supplier=Digikey; ComponentLink3URL: https://datasheet.ciiva.com/14168/sy600925-e-14168052.pdf?src-supplier=Distrelec; ComponentLink3Description: https://datasheet.ciiva.com/14168/sy600925-e-14168052.pdf?src-supplier=Distrelec; ComponentLink4URL: https://datasheet.ciiva.com/5762/mbr0520lt1-d-5762891.pdf?src-supplier=Farnell; ComponentLink4Description: https://datasheet.ciiva.com/5762/mbr0520lt1-d-5762891.pdf?src-supplier=Farnell; ComponentLink5URL: https://datasheet.ciiva.com/7962/mbr0520lt1-d-7962698.pdf?src-supplier=Element14; ComponentLink5Description: https://datasheet.ciiva.com/7962/mbr0520lt1-d-7962698.pdf?src-supplier=Element14; ComponentLink6URL: https://datasheet.ciiva.com/5762/mbr0520lt1-d-5762889.pdf?src-supplier=Farnell; ComponentLink6Description: https://datasheet.ciiva.com/5762/mbr0520lt1-d-5762889.pdf?src-supplier=Farnell; ComponentLink7URL: https://datasheet.ciiva.com/14559/70099495-14559898.pdf?src-supplier=Allied+Electronics; ComponentLink7Description: https://datasheet.ciiva.com/14559/70099495-14559898.pdf?src-supplier=Allied+Electronics; ComponentLink8URL: https://datasheet.ciiva.com/4714/mbr0520lt1-d-94265-4714156.pdf?src-supplier=Mouser; ComponentLink8Description: https://datasheet.ciiva.com/4714/mbr0520lt1-d-94265-4714156.pdf?src-supplier=Mouser; ComponentLink9URL: https://datasheet.ciiva.com/7961/mbr0520lt1-d-7961765.pdf?src-supplier=Element14; ComponentLink9Description: https://datasheet.ciiva.com/7961/mbr0520lt1-d-7961765.pdf?src-supplier=Element14; ComponentLink10URL: https://datasheet.ciiva.com/7962/mbr0520lt1-d-7962699.pdf?src-supplier=Element14; ComponentLink10Description: https://datasheet.ciiva.com/7962/mbr0520lt1-d-7962699.pdf?src-supplier=Element14; ComponentLink11URL: https://datasheet.ciiva.com/16395/mbr0520lt1-d-16395977.pdf?src-supplier=Future+Electronics; ComponentLink11Description: https://datasheet.ciiva.com/16395/mbr0520lt1-d-16395977.pdf?src-supplier=Future+Electronics; ComponentLink12URL: https://datasheet.ciiva.com/915/mbr0520lt1-d-915489.pdf?src-supplier=Digikey; ComponentLink12Description: https://datasheet.ciiva.com/915/mbr0520lt1-d-915489.pdf?src-supplier=Digikey; ComponentLink13URL: https://datasheet.ciiva.com/915/mbr0520lt1-d-915490.pdf?src-supplier=Digikey; ComponentLink13Description: https://datasheet.ciiva.com/915/mbr0520lt1-d-915490.pdf?src-supplier=Digikey; LCSC Part Number: C23848; Item Type: Diode
footprint SOD-123
pins: 1 A, 2 K

## MBR0540-TP
designator D?
40V 550mV@500mA 500mA SOD-123 Schottky Diodes ROHS; Manufacturer: MCC(Micro Commercial Components); Manufacturer Part Number: MBR0540-TP; Forward Voltage: 385mV; Polarity: Standard; Voltage Rating (DC): 20V; Max Surge Current: 5.5A; Max Reverse Current: 250uA; Element Configuration: Single; Item Type: Diode; RoHS: Yes; Category: Schottky Diodes; Pricing: 1=0.36, 10=0.255, 100=0.129, 500=0.1052, 1000=0.07805 (USD); Case/Package: SOD-123-2; Pins: 2; Min Operating Temperature: -65°C; Max Operating Temperature: 125°C; Current Rating: 500mA; Output Current: 500mA; Packaging: Tape and Reel; Package Quantity: 1; Forward Current: 500mA; Average Rectified Current: 500mA; Max Reverse Leakage Current: 250uA; Max Repetitive Reverse Voltage (Vrrm): 20V; Peak Non-Repetitive Surge Current: 5.5A; Max Forward Surge Current (Ifsm): 5.5A; Termination: SMD/SMT; Max Reverse Voltage (DC): 20V; Series: -; Length: 2.69mm; Width: 1.6mm; Height: 1.12mm; Radiation Hardening: No; Lead Free: Lead Free; Reach SVHC Compliant: No; RoHS Compliant: Yes; LCSC Part Number: C78744; ComponentLink1Description: LCSC; ComponentLink1URL: https://www.lcsc.com/product-detail/Schottky-Diodes_MCC-Micro-Commercial-Components-MBR0540-TP_C78744.html?s_z=n_MBR0540-TP
footprint SOD-123
pins: 1 A, 2 K

## MBR3060DC-R
designator D?
60V 30A 630mV@15A TO-263 Schottky Barrier Diodes (SBD) ROHS; Manufacturer: YFW; Manufacturer Part Number: MBR3060DC-R; Item Type: Diode; Package: TO-263; LCSC Part Number: C7436457; ComponentLink1Description: LCSC; ComponentLink1URL: https://www.lcsc.com/product-detail/Schottky-Barrier-Diodes-SBD_YFW-MBR3060DC-R_C7436457.html
footprint TO-263
pins: 1, 2, 3

## MBR20200DT
designator D?
200V Single 920mV@10A 20A TO-252 Schottky Barrier Diodes (SBD) ROHS; Manufacturer: JUXING; Manufacturer Part Number: MBR20200DT; Item Type: Diode; Package: TO-252; LCSC Part Number: C3011045; ComponentLink1Description: LCSC; ComponentLink1URL: https://www.lcsc.com/product-detail/span-style-background-color-ff0-Schottky-span-Barrier-Diodes-SBD_JUXING-MBR20200DT_C3011045.html
footprint TO-252-2L
pins: 1, 2, 3

## MBRB20200CTT4G
designator D?
DIODE ARRAY SCHOT 200V 10A D2PAK; Manufacturer: ON Semiconductor; Manufacturer Part Number: MBRB20200CTT4G; Item Type: Diodes; Supplier: Arrow Electronics; LCSC Part Number: C236141; RoHS: Yes; Stock: 20800; Pricing: 800=0.9164, 9600=0.771 (USD); ComponentLink1URL: https://datasheet.ciiva.com/8292/mbrb20200ct-d-8292160.pdf?src-supplier=Avnet; ComponentLink1Description: https://datasheet.ciiva.com/8292/mbrb20200ct-d-8292160.pdf?src-supplier=Avnet; ComponentLink2URL: https://datasheet.ciiva.com/30479/0900766b811a6558-30479443.pdf?src-supplier=Rs; ComponentLink2Description: https://datasheet.ciiva.com/30479/0900766b811a6558-30479443.pdf?src-supplier=Rs; ComponentLink3URL: https://datasheet.ciiva.com/7963/85948-7963012.pdf?src-supplier=Element14; ComponentLink3Description: https://datasheet.ciiva.com/7963/85948-7963012.pdf?src-supplier=Element14; ComponentLink4URL: https://datasheet.ciiva.com/8299/mbrb20200ct-d-8299926.pdf?src-supplier=Avnet; ComponentLink4Description: https://datasheet.ciiva.com/8299/mbrb20200ct-d-8299926.pdf?src-supplier=Avnet; ComponentLink5URL: https://datasheet.ciiva.com/906/mbrb20200ct-d-906011.pdf?src-supplier=Digikey; ComponentLink5Description: https://datasheet.ciiva.com/906/mbrb20200ct-d-906011.pdf?src-supplier=Digikey; ComponentLink6URL: https://datasheet.ciiva.com/906/mbrb20200ct-d-906012.pdf?src-supplier=Digikey; ComponentLink6Description: https://datasheet.ciiva.com/906/mbrb20200ct-d-906012.pdf?src-supplier=Digikey; ComponentLink7URL: https://datasheet.ciiva.com/906/mbrb20200ct-d-906013.pdf?src-supplier=Digikey; ComponentLink7Description: https://datasheet.ciiva.com/906/mbrb20200ct-d-906013.pdf?src-supplier=Digikey
footprint D2Pak.
pins: 1 A, 2 A, 3 K

## MBRS2H100T3G
designator D?
DIODE SCHOTTKY 100V 2A SMB; Manufacturer: ON Semiconductor; Manufacturer Part Number: MBRS2H100T3G; Supplier: Future Electronics; LCSC Part Number: C83299; RoHS: Yes; Item Type: Diode; Stock: 27500; Pricing: 2500=0.155, 5000=0.151, 7500=0.15, 10000=0.148, 12500=0.144 (USD); Lead Free: 5697LeadFree; Halogen Free: 5694HalogenFree; ComponentLink1URL: https://datasheet.ciiva.com/916/mbrs2h100-d-916033.pdf?src-supplier=Digikey; ComponentLink1Description: https://datasheet.ciiva.com/916/mbrs2h100-d-916033.pdf?src-supplier=Digikey; ComponentLink2URL: https://datasheet.ciiva.com/13084/mbrs2h100-d-76602-13084146.pdf?src-supplier=Mouser; ComponentLink2Description: https://datasheet.ciiva.com/13084/mbrs2h100-d-76602-13084146.pdf?src-supplier=Mouser; ComponentLink3URL: https://datasheet.ciiva.com/30479/0900766b812769c5-30479153.pdf?src-supplier=Rs; ComponentLink3Description: https://datasheet.ciiva.com/30479/0900766b812769c5-30479153.pdf?src-supplier=Rs; ComponentLink4URL: https://datasheet.ciiva.com/8292/mbrs2h100-d-8292460.pdf?src-supplier=Avnet; ComponentLink4Description: https://datasheet.ciiva.com/8292/mbrs2h100-d-8292460.pdf?src-supplier=Avnet; ComponentLink5URL: https://datasheet.ciiva.com/8294/mbrs2h100-d-8294965.pdf?src-supplier=Avnet; ComponentLink5Description: https://datasheet.ciiva.com/8294/mbrs2h100-d-8294965.pdf?src-supplier=Avnet; ComponentLink6URL: https://datasheet.ciiva.com/916/mbrs2h100-d-916034.pdf?src-supplier=Digikey; ComponentLink6Description: https://datasheet.ciiva.com/916/mbrs2h100-d-916034.pdf?src-supplier=Digikey; ComponentLink7URL: https://datasheet.ciiva.com/916/mbrs2h100-d-916035.pdf?src-supplier=Digikey; ComponentLink7Description: https://datasheet.ciiva.com/916/mbrs2h100-d-916035.pdf?src-supplier=Digikey
footprint SMB_
pins: 1 A, 2 K

## MBRS4201T3G
designator D?
200V Independent Type 4A 860mV@4A SMC(DO-214AB) Schottky Diodes ROHS; Manufacturer: FUXINSEMI; Manufacturer Part Number: MBRS4201T3G; Item Type: Diode; Package: SMC(DO-214AB); LCSC Part Number: C5563749; ComponentLink1Description: LCSC; ComponentLink1URL: https://www.lcsc.com/product-detail/Schottky-Diodes_FUXINSEMI-MBRS4201T3G_C5563749.html?s_z=n_%2520MBRS4201T3G
footprint SMC
pins: 1 K, 2 A

## MDB6S
designator BR?
BRIDGE RECT 1P 600V 1A 4MICRODIP; Manufacturer: ON Semiconductor / Fairchild; Manufacturer Part Number: MDB6S; Item Type: Diodes; Supplier: Future Electronics; LCSC Part Number: C895500; RoHS: Yes; Stock: 170000; Pricing: 5000=0.128, 10000=0.126, 15000=0.125 (USD); Lead Free: 5697LeadFree; ComponentLink1URL: https://datasheet.ciiva.com/4433/mdb6s-195692-4433151.pdf?src-supplier=Mouser; ComponentLink1Description: https://datasheet.ciiva.com/4433/mdb6s-195692-4433151.pdf?src-supplier=Mouser; ComponentLink2URL: https://datasheet.ciiva.com/11195/mdb8s-11195777.pdf?src-supplier=Avnet; ComponentLink2Description: https://datasheet.ciiva.com/11195/mdb8s-11195777.pdf?src-supplier=Avnet; ComponentLink3URL: https://datasheet.ciiva.com/30480/0900766b81185ceb-30480759.pdf?src-supplier=Rs; ComponentLink3Description: https://datasheet.ciiva.com/30480/0900766b81185ceb-30480759.pdf?src-supplier=Rs; ComponentLink4URL: https://datasheet.ciiva.com/6390/mdb10s-6390582.pdf?src-supplier=Digikey; ComponentLink4Description: https://datasheet.ciiva.com/6390/mdb10s-6390582.pdf?src-supplier=Digikey; ComponentLink5URL: https://datasheet.ciiva.com/6390/mdb10s-6390583.pdf?src-supplier=Digikey; ComponentLink5Description: https://datasheet.ciiva.com/6390/mdb10s-6390583.pdf?src-supplier=Digikey; ComponentLink6URL: https://datasheet.ciiva.com/6390/mdb10s-6390584.pdf?src-supplier=Digikey; ComponentLink6Description: https://datasheet.ciiva.com/6390/mdb10s-6390584.pdf?src-supplier=Digikey
footprint TSSOP-4(5.0x4.4)
pins: 1 +, 2 -, 3 AC, 4 AC